# Altium schematic symbol library Schlib1.SchLib: 6 symbols
Pins are listed as number, name and electrical type; pins without a type are passive.

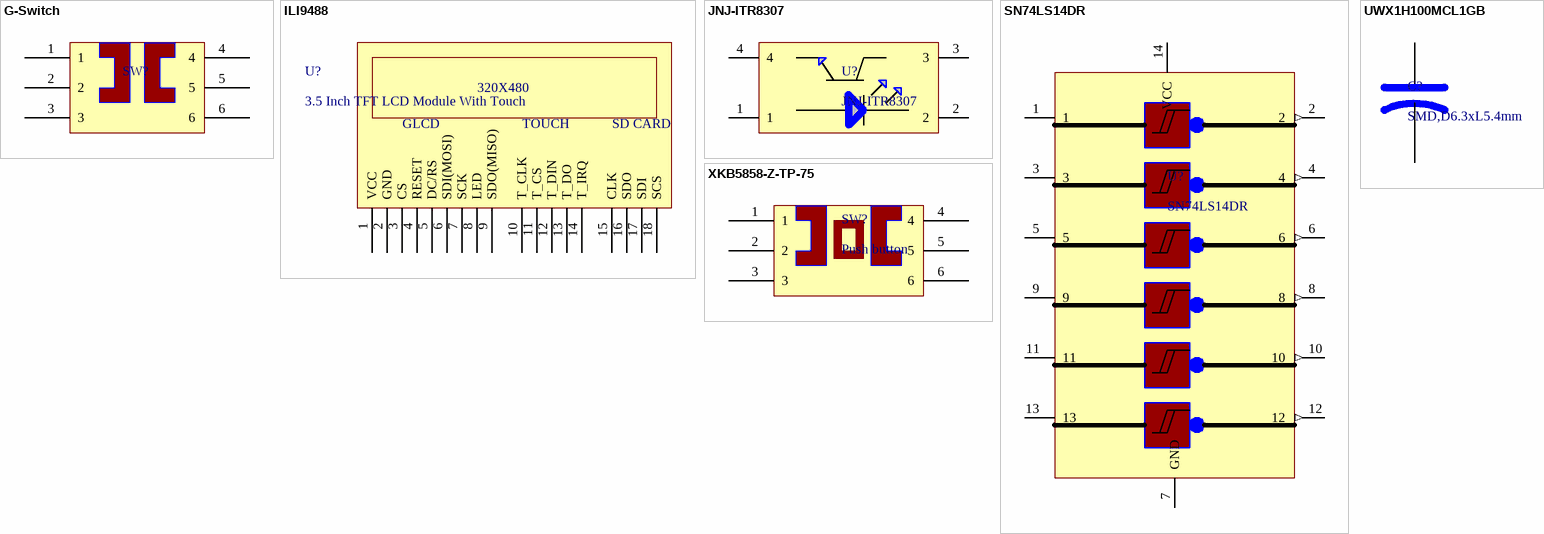
[diagram p0: symbols G-Switch to XKB5858-Z-TP-75]

## G-Switch
designator SW?, comment MS-22C01-G010  (value not drawn)
Standing paste 1A DPDT 6V Black 10000 times SMD Slide Switches ROHS
footprint G Switch (Standing paste 1A DPDT 6V Black 10000 times SMD Slide Switches ROHS)
pins: 1, 2, 3, 4, 5, 6

## ILI9488
designator U?, comment 3.5 Inch TFT LCD Module With Touch
ComponentLink1Description: New link; ComponentLink1URL: https://www.aliexpress.com/item/32954128438.html?spm=a2g0o.order_list.order_list_main.44.5fd61802HfjXd0
footprint PCBComponent_1
pins: 1 VCC, 2 GND, 3 CS, 4 RESET, 5 DC/RS, 6 SDI(MOSI), 7 SCK, 8 LED, 9 SDO(MISO), 10 T_CLK, 11 T_CS, 12 T_DIN, 13 T_DO, 14 T_IRQ, 15 CLK, 16 SDO, 17 SDI, 18 SCS
text: 320X480; GLCD; TOUCH; SD CARD

## JNJ-ITR8307
designator U?
SMD-4P,3.4x2.7mm Reflective Optical Interrupters ROHS
footprint JNJ-ITR8307 (SMD-4P,3.4x2.7mm Reflective Optical Interrupters ROHS)
pins: 1 (power), 2 (power), 3 (power), 4 (power)

## SN74LS14DR
designator U?
Schmitt Trigger 6 21ns@6V 2uA 2V~6V SOP-14 Inverters ROHS
footprint SOP127P602X175-14N
pins: 1 (power), 2 (out), 3 (power), 4 (out), 5 (power), 6 (out), 7 GND (power), 8 (out), 9 (power), 10 (out), 11 (power), 12 (out), 13 (power), 14 VCC (power)

## UWX1H100MCL1GB
designator C?, comment SMD,D6.3xL5.4mm
footprint CAPAE660X550N
pins: N (power), P (power)

## XKB5858-Z-TP-75
designator SW?, comment Push button
250V 30V LATCHING Standing paste 100000 Times Without 160gf 100mA SMD Pushbutton Switches ROHS; ComponentLink1Description: Data sheet; ComponentLink1URL: https://www.lcsc.com/datasheet/lcsc_datasheet_2110111430_XKB-Connection-XKB5858-Z-TP-75_C692487.pdf
footprint XKB5858-Z-TP-75 (250V 30V LATCHING Standing paste 100000 Times Without 160gf 100mA SMD Pushbutton Switches ROHS)
pins: 1, 2, 3, 4, 5, 6